# Altium schematic symbol library Power.SchLib: 8 symbols
Pins are listed as number, name and electrical type; pins without a type are passive.

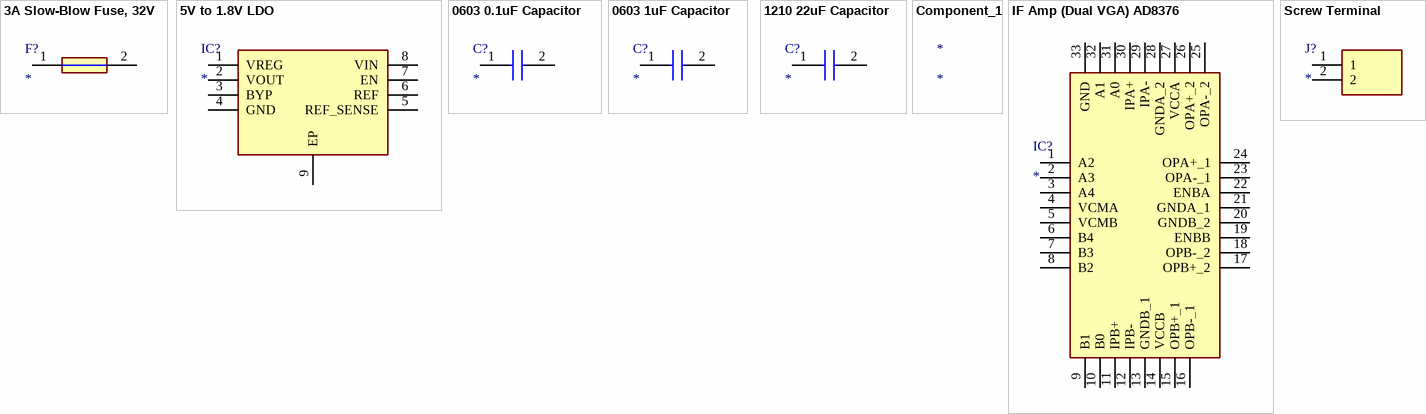
[diagram p0: symbols 3A Slow-Blow Fuse, 32V to Screw Terminal]

## 3A Slow-Blow Fuse, 32V
designator F?
0407003.WRA; Manufacturer_Name: LITTELFUSE; Description: Surface Mount Fuses; Datasheet Link: https://cdn1-originals.webdamdb.com/12956_127233622?cache=1686747046&response-content-disposition=inline;filename=Littelfuse_Fuse_407A_Datasheet.pdf&response-content-type=application/pdf&Policy=eyJTdGF0ZW1lbnQiOlt7IlJlc291cmNlIjoiaHR0cCo6Ly9jZG4xLW9yaWdpb; Height: 0.985mm; Manufacturer_Part_Number: 0407003.WRA; Mouser Part Number: 576-0407003.WRA; Mouser Price/Stock: https://www.mouser.co.uk/ProductDetail/Littelfuse/0407003.WRA?qs=QNEnbhJQKvag6lfcn2%2FiyQ%3D%3D
footprint FUSC3216X98N
pins: 1, 2

## 5V to 1.8V LDO
designator IC?
ADM7150ACPZ-1.8-R7; Manufacturer_Name: Analog Devices; Description: LDO Voltage Regulators 800mA ULN LDO 1.8Vo; Datasheet Link: https://www.analog.com/media/en/technical-documentation/data-sheets/ADM7150.pdf; Height: 0.85mm; Manufacturer_Part_Number: ADM7150ACPZ-1.8-R7; Mouser Part Number: 584-ADM7150ACPZ1.8R7; Mouser Price/Stock: https://www.mouser.co.uk/ProductDetail/Analog-Devices/ADM7150ACPZ-1.8-R7?qs=y2kkmE52mdMoOvxUkkHOHg%3D%3D; Arrow Part Number: ADM7150ACPZ-1.8-R7; Arrow Price/Stock: https://www.arrow.com/en/products/adm7150acpz-1.8-r7/analog-devices.html?utm_currency=USD&region=nac
footprint SON50P300X300X85-9N-D
pins: 1 VREG, 2 VOUT, 3 BYP, 4 GND, 5 REF_SENSE, 6 REF, 7 EN, 8 VIN, 9 EP

## 0603 0.1uF Capacitor
designator C?
C1608X7R1H104K080AA; Manufacturer_Name: TDK; Description: MULTILAYER CERAMIC CHIP CAPACITORS; Datasheet Link: https://product.tdk.com/info/en/catalog/datasheets/mlcc_commercial_midvoltage_en.pdf; Height: 0.8mm; Manufacturer_Part_Number: C1608X7R1H104K080AA; Mouser Part Number: 810-C1608X7R1H104K; Mouser Price/Stock: https://www.mouser.co.uk/ProductDetail/TDK/C1608X7R1H104K080AA?qs=NRhsANhppD8dEJli2CDBHA%3D%3D; Arrow Part Number: C1608X7R1H104K080AA; Arrow Price/Stock: https://www.arrow.com/en/products/c1608x7r1h104k080aa/tdk.html?utm_currency=USD&region=asia
footprint CAPC1608X80N
pins: 1, 2

## 0603 1uF Capacitor
designator C?
C1608X7R1C105K080AC; Manufacturer_Name: TDK; Description: 0603 X7R ceramic capacitor 16V 1uF TDK C1608 C 1??F Ceramic Multilayer Capacitor; Datasheet Link: https://product.tdk.com/info/en/catalog/datasheets/mlcc_commercial_midvoltage_en.pdf; Height: 0.8mm; Manufacturer_Part_Number: C1608X7R1C105K080AC; Mouser Part Number: 810-C1608X7R1C105K; Mouser Price/Stock: https://www.mouser.co.uk/ProductDetail/TDK/C1608X7R1C105K080AC?qs=NRhsANhppD%2FMM4SE1SUXmg%3D%3D; Arrow Part Number: C1608X7R1C105K080AC; Arrow Price/Stock: https://www.arrow.com/en/products/c1608x7r1c105k080ac/tdk?utm_currency=USD&region=nac
footprint CAPC1608X80N
pins: 1, 2

## 1210 22uF Capacitor
designator C?
C3225X7R1E226M250AB; Manufacturer_Name: TDK; Description: MULTILAYER CERAMIC CHIP CAPACITORS; Datasheet Link: https://product.tdk.com/info/en/catalog/datasheets/mlcc_commercial_midvoltage_en.pdf; Height: 2.3mm; Manufacturer_Part_Number: C3225X7R1E226M250AB; Mouser Part Number: 810-C3225X7R1EM250AB; Mouser Price/Stock: https://www.mouser.co.uk/ProductDetail/TDK/C3225X7R1E226M250AB?qs=gZXFycFWdAOxso2lxwRfpg%3D%3D; Arrow Part Number: C3225X7R1E226M250AB; Arrow Price/Stock: https://www.arrow.com/en/products/c3225x7r1e226m250ab/tdk?region=nac
footprint CAPC3225X230N
pins: 1, 2

## Component_1
designator *

## IF Amp (Dual VGA) AD8376
designator IC?
AD8376ACPZ-R7; Manufacturer_Name: Analog Devices; Description: Special Purpose Amplifiers If Cellular Dual DGA; Datasheet Link: https://www.analog.com/media/en/technical-documentation/data-sheets/ad8376.pdf; Height: 0.8mm; Manufacturer_Part_Number: AD8376ACPZ-R7; Mouser Part Number: 584-AD8376ACPZ-R7; Mouser Price/Stock: https://www.mouser.co.uk/ProductDetail/Analog-Devices/AD8376ACPZ-R7?qs=%2FtpEQrCGXCx%252BVfPSiG%2FcvQ%3D%3D; Arrow Part Number: AD8376ACPZ-R7; Arrow Price/Stock: https://www.arrow.com/en/products/ad8376acpz-r7/analog-devices?region=nac
footprint QFN50P500X500X80-33N-D
pins: 1 A2, 2 A3, 3 A4, 4 VCMA, 5 VCMB, 6 B4, 7 B3, 8 B2, 9 B1, 10 B0, 11 IPB+, 12 IPB-, 13 GNDB_1, 14 VCCB, 15 OPB+_1, 16 OPB-_1, 17 OPB+_2, 18 OPB-_2, 19 ENBB, 20 GNDB_2, 21 GNDA_1, 22 ENBA, 23 OPA-_1, 24 OPA+_1, 25 OPA-_2, 26 OPA+_2, 27 VCCA, 28 GNDA_2, 29 IPA-, 30 IPA+, 31 A0, 32 A1, 33 GND

## Screw Terminal
designator J?
TB007-508-02BE; Manufacturer_Name: Same Sky; Description: TB007-508 Series - 2~24 Poles; Datasheet Link: https://www.sameskydevices.com/product/resource/supplyframepdf/tb007-508.pdf; Height: 14mm; Manufacturer_Part_Number: TB007-508-02BE; Mouser Part Number: 490-TB007-508-02BE; Mouser Price/Stock: https://www.mouser.co.uk/ProductDetail/Same-Sky/TB007-508-02BE?qs=vLWxofP3U2y6PFKAfCqKUQ%3D%3D; Arrow Part Number: TB007-508-02BE; Arrow Price/Stock: https://www.arrow.com/en/products/tb007-508-02be/cui-devices.html?utm_currency=USD&region=asia
footprint TB007-508-02BE
pins: 1, 2